# Altium footprint library KartaRfLibs.PcbLib: 51 footprints (part 4 of 4)
Each footprint in its own frame and in the unit in brackets; x right, y up, seen from the top. Pads: shape width x height; smd on the part's side, far side on the other; paste and mask are expansions set on the pad; w line width, h text height; cw(c..) or ccw(c..) is an arc to the next point about the centre after c.
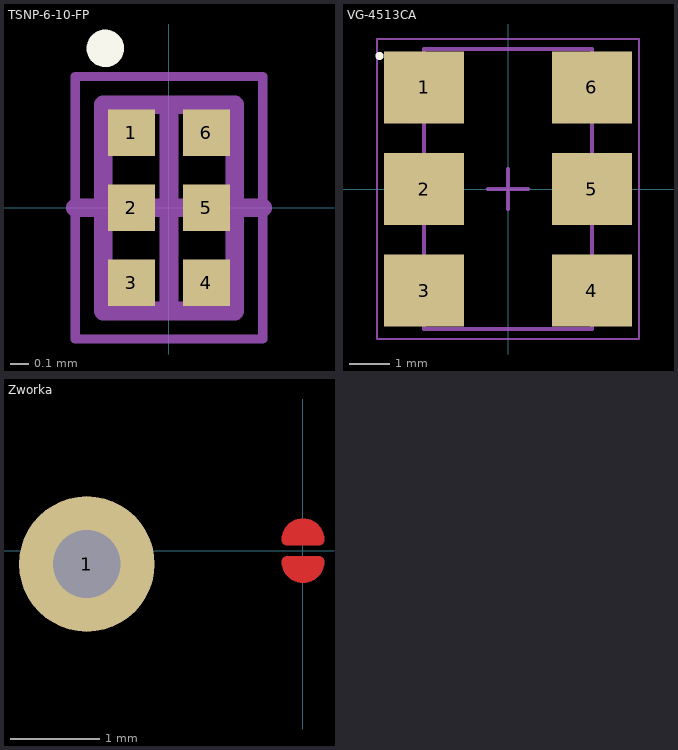
[diagram p3: the footprints below, top view; thin cyan lines are the x and y axes]

## TSNP-6-10-FP [mm] "TSNP-6-10-FP, SOTFL, 6-Leads, Body 1,10x0,80mm, Pitch 0,40mm, IPC Medium Density"
height 0.37
pads (6):
  rect 0.25x0.25 smd: 1(-0.2,0.4) 2(-0.2,0) 3(-0.2,-0.4) 4(0.2,-0.4) 5(0.2,0) 6(0.2,0.4)
Top Overlay:
  circle w0.1: c-0.34,0.85 r0.05
Mechanical 13:
  lines w0.1: -0.35,-0.55 0.35,-0.55 0.35,0.55 -0.35,0.55 -0.35,-0.55
Mechanical 15:
  lines w0.05: -0.5,-0.7 0.5,-0.7 0.5,0.7 -0.5,0.7 -0.5,-0.7
  lines w0.1: -0.5,0 0.5,0 ; 0,-0.5 0,0.5
3D body "TSNP-6-10-FP.step": height 0.37, standoff 0, extent -0.4,-0.548 0.4,0.548

## VG-4513CA [mm] "VG-4513CA, Concave, 6-Leads, Pitch 2,54mm,  Body 7,00x5,00mm,  IPC Medium Density"
height 1.6
pads (6):
  rect 2x1.8 smd: 1(-2.1,2.54) 2(-2.1,0) 3(-2.1,-2.54) 4(2.1,-2.54) 5(2.1,0) 6(2.1,2.54)
Top Overlay:
  circle w0.1: c-3.212,3.328 r0.05
Mechanical 13:
  lines w0.1: -2.1,-3.5 -2.1,-3.24 ccw(c-2.1,-2.54) -2.1,-1.84 -2.1,-0.7 ccw(c-2.1,0) -2.1,0.7 -2.1,1.84 ccw(c-2.1,2.54) -2.1,3.24 -2.1,3.5 2.1,3.5 2.1,3.24 ccw(c2.1,2.54) 2.1,1.84 2.1,0.7 ccw(c2.1,0) 2.1,-0.7 2.1,-1.84 ccw(c2.1,-2.54) 2.1,-3.24 2.1,-3.5 -2.1,-3.5
Mechanical 15:
  lines w0.05: -3.27,-3.75 -3.27,3.75 3.27,3.75 3.27,-3.75 -3.27,-3.75
  lines w0.1: -0.5,0 0.5,0 ; 0,-0.5 0,0.5
3D body "VG-4513CA.step": height 1.6, standoff 0, extent -2.55,-3.5 2.55,3.5

## Zworka [mil]
pads (1):
  round 60 hole 30: 1(-95.67,-5.91)
Top Layer:
  lines w4.92: -7.09,-4.72 7.09,-4.72 ; -7.09,4.72 7.09,4.72 ; -3.94,7.87 3.15,7.87 ; -3.15,-7.87 3.94,-7.87
  lines w4.93: -7.09,-4.72 ccw(c0,-4.72) 7.09,-4.72 ; -7.09,4.72 cw(c0,4.72) 7.09,4.72